# Altium footprint library LED-Optocupler$.PcbLib: 72 footprints (part 3 of 5)
Each footprint in its own frame and in the unit in brackets; x right, y up, seen from the top. Pads: shape width x height; smd on the part's side, far side on the other; paste and mask are expansions set on the pad; w line width, h text height; cw(c..) or ccw(c..) is an arc to the next point about the centre after c.
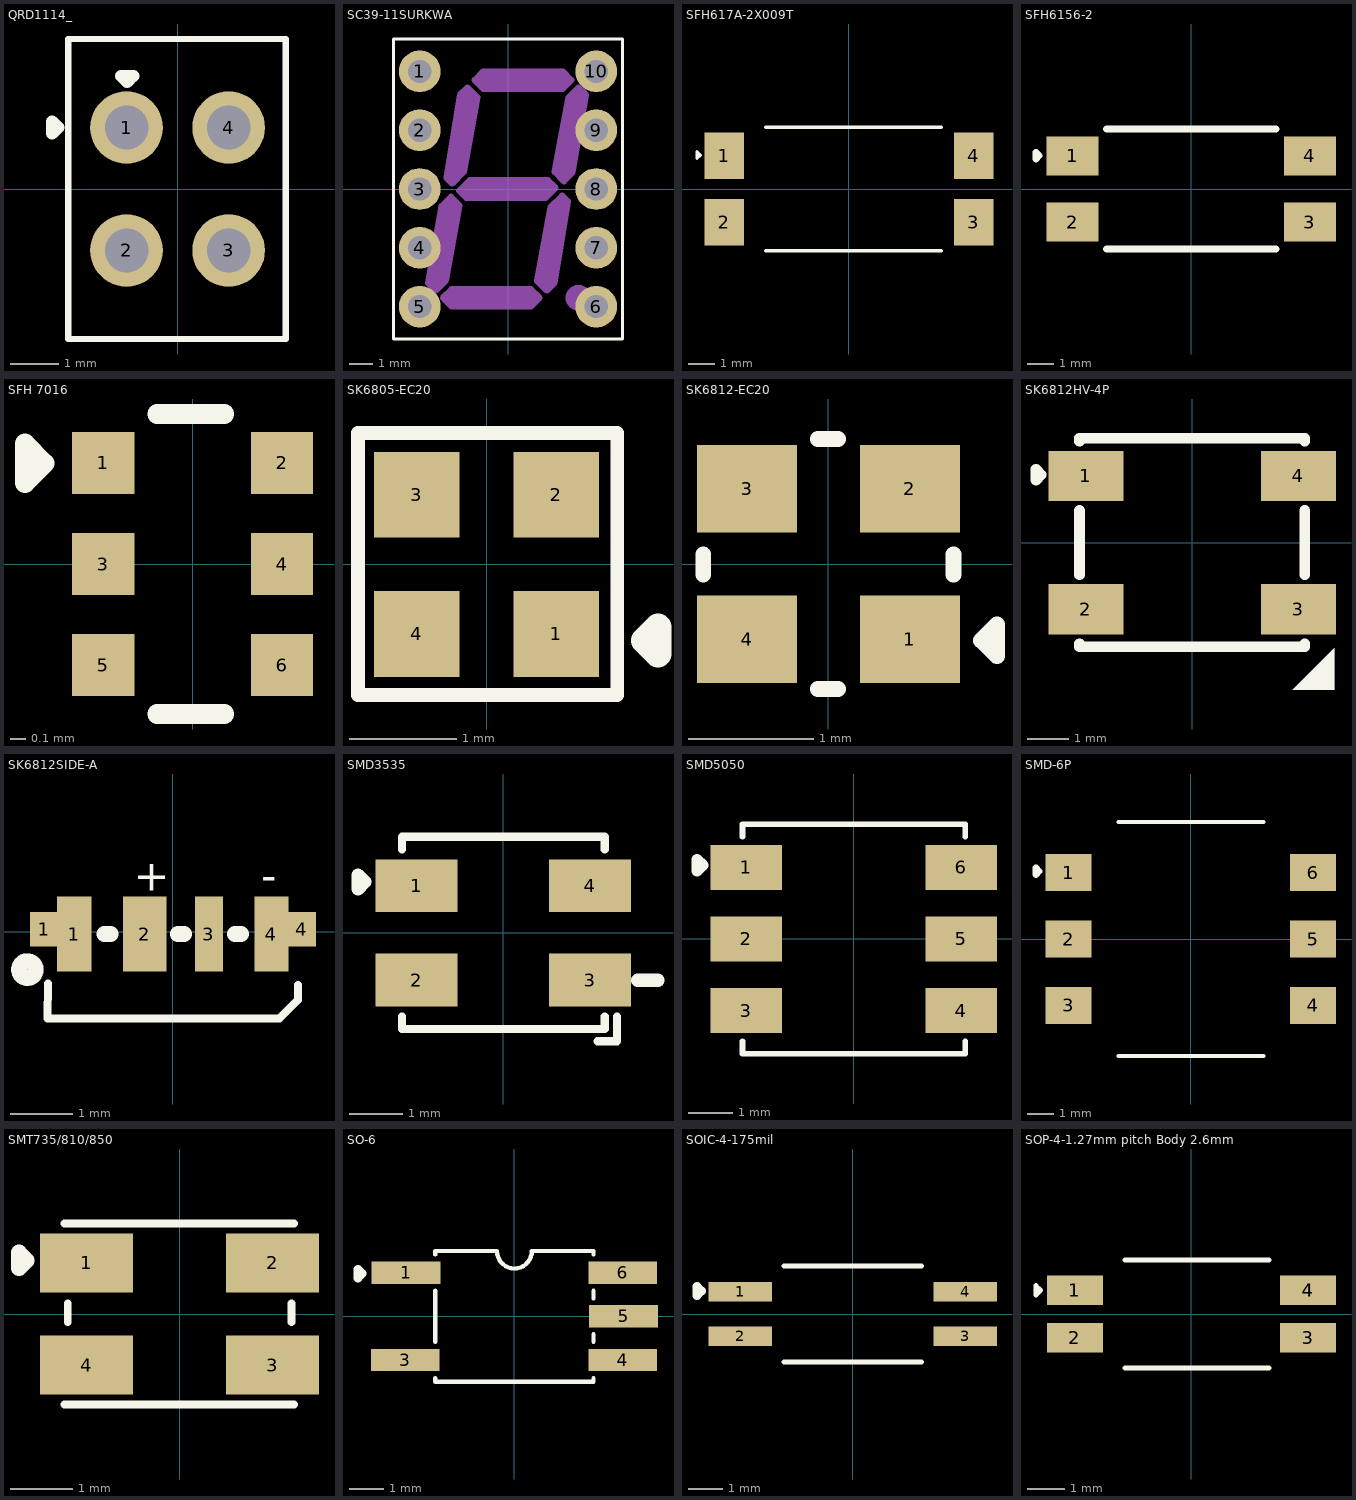
[diagram p2: the footprints below, top view; thin cyan lines are the x and y axes]

## QRD1114_ [mm]
pads (4):
  round 1.5 hole 0.9: 1(-1.055,1.27) 2(-1.055,-1.27) 3(1.055,-1.27) 4(1.055,1.27)
Top Overlay:
  lines w0.127: -2.261,-3.099 -2.261,3.099 2.235,3.099 2.235,-3.099 -2.261,-3.099
  lines w0.25: -2.591,1.143 -2.591,1.397 -2.464,1.27 -2.591,1.143 ; -1.168,2.337 -0.914,2.337 -1.041,2.21 -1.168,2.337
3D body "QRD1114.STEP": height 4.65, standoff -2, extent -2.205,-3.05 2.195,3.05

## SC39-11SURKWA [mm]
pads (10):
  round 1.8 hole 1: 1(-3.81,5.08) 2(-3.81,2.54) 3(-3.81,0) 4(-3.81,-2.54) 5(-3.81,-5.08) 6(3.81,-5.08) 7(3.81,-2.54) 8(3.81,0) 9(3.81,2.54) 10(3.81,5.08)
Top Overlay:
  lines w0.127: -4.953,-6.477 4.953,-6.477 4.953,6.477 -4.953,6.477 -4.953,-6.477
Mechanical 13:
  circle w0.61: c3.048,-4.699 r0.254
  lines w0.254: -3.454,-4.064 -2.87,-0.737 -2.464,-0.33 -2.083,-0.711 -2.667,-3.937 -3.124,-4.394 -3.454,-4.064 ; -2.819,-4.699 -2.438,-4.318 0.991,-4.318 1.372,-4.699 0.991,-5.08 -2.438,-5.08 -2.819,-4.699 ; -2.667,0.483 -2.413,0.229 -1.905,0.737 -1.321,3.962 -1.753,4.394 -2.083,4.064 -2.667,0.483 ; -2.108,-0.076 -1.651,0.381 1.727,0.381 2.057,0.051 1.626,-0.381 -1.803,-0.381 -2.108,-0.076 ; -1.448,4.699 -1.067,4.318 2.362,4.318 2.743,4.699 2.362,5.08 -1.067,5.08 -1.448,4.699 ; 1.245,-3.962 1.829,-0.787 2.337,-0.279 2.591,-0.533 2.007,-4.064 1.676,-4.394 1.245,-3.962 ; 2.007,0.737 2.616,3.962 3.048,4.394 3.378,4.064 2.794,0.711 2.413,0.33 2.007,0.737
  lines w0.305: 2.921,-4.699 3.175,-4.699
  lines w0.61: -3.048,-3.937 -2.413,-0.635 ; -2.413,-4.699 1.016,-4.699 ; -2.286,0.635 -1.778,3.937 ; -1.778,0 1.651,0 ; -1.016,4.699 2.413,4.699 ; 1.651,-3.937 2.286,-0.635 ; 2.413,0.762 3.048,4.064

## SFH617A-2X009T [mm]
pads (4):
  rect 1.52x1.78 smd mask+0.07: 1(-4.765,1.27) 2(-4.765,-1.27) 3(4.765,-1.27) 4(4.765,1.27)
Top Overlay:
  lines w0.127: -3.175,-2.362 3.531,-2.362 ; -3.175,2.362 3.531,2.362 ; -5.806,1.168 -5.806,1.422 -5.679,1.295 -5.806,1.168
3D body "DIP4-OP7.STEP": height 3.75, standoff 0.06, extent -5.08,-2.29 5.08,2.29

## SFH6156-2 [mm]
pads (4):
  rect 2x1.5 smd: 1(-4.55,1.27) 2(-4.55,-1.27) 3(4.55,-1.27) 4(4.55,1.27)
Top Overlay:
  lines w0.254: -3.25,-2.3 3.25,-2.3 ; -3.25,2.3 3.25,2.3 ; -5.956,1.152 -5.956,1.406 -5.829,1.279 -5.956,1.152
3D body "C5156027.step": height 3.67, standoff 0, extent -4.9,-2.35 4.9,2.35

## SFH 7016 [mm]
pads (6):
  rect 0.4x0.4 smd: 1(-0.575,0.65) 2(0.575,0.65) 3(-0.575,0) 4(0.575,0) 5(-0.575,-0.65) 6(0.575,-0.65)
Top Overlay:
  lines w0.127: -0.229,-0.965 0.203,-0.965 ; -0.229,0.965 0.203,0.965 ; -1.079,0.521 -1.079,0.775 -0.953,0.648 -1.079,0.521
3D body "SFH_7016.stp": height 0.58, standoff -0.02, extent -0.825,-0.925 0.825,0.925

## SK6805-EC20 [mm]
pads (4):
  rect 0.8x0.8 smd: 1(0.65,-0.65) 2(0.65,0.65) 3(-0.65,0.65) 4(-0.65,-0.65)
Top Overlay:
  lines w0.127: 1.219,1.219 1.219,-1.219 -1.199,-1.219 -1.199,1.225 1.219,1.225
  lines w0.25: 1.473,-0.711 1.6,-0.838 1.6,-0.584 1.473,-0.711
3D body "C2890036.step": height 0.67, standoff 0, extent -1,-1.01 1,1

## SK6812-EC20 [mm]
pads (4):
  rect 0.8x0.7 smd: 1(0.65,-0.6) 2(0.65,0.6) 3(-0.65,0.6) 4(-0.65,-0.6)
Top Overlay:
  lines w0.127: -1,-0.086 -1,0.076 ; -0.086,-1 0.076,-1 ; -0.086,1 0.076,1 ; 1,-0.086 1,0.076 ; 1.219,-0.61 1.346,-0.737 1.346,-0.483 1.219,-0.61
3D body "OPSCO-Optoelectronics-SK6812-EC20_C2909058.STEP": height 0.65, standoff -0.01, extent -1,-1 1,1

## SK6812HV-4P [mm]
pads (4):
  rect 1.8x1.2 smd paste+0 mask+0.051: 1(-2.55,1.6) 2(-2.55,-1.6) 3(2.55,-1.6) 4(2.55,1.6)
Top Overlay:
  region: 3.41,-3.53 2.41,-3.53 3.41,-2.53
  lines w0.254: -2.7,-2.431 -2.7,-2.5 2.7,-2.5 2.7,-2.431 ; -2.7,-0.769 -2.7,0.769 ; -2.7,2.47 -2.7,2.431 -2.7,2.5 2.7,2.5 2.7,2.431 ; 2.7,-0.769 2.7,0.769 ; -3.744,1.498 -3.744,1.752 -3.617,1.625 -3.744,1.498
Mechanical 15:
  region: 3.41,-3.53 2.41,-3.53 3.41,-2.53
3D body "SK6812HV-4P-1.STEP": height 1.65, standoff 0, extent -2.7,-2.5 2.7,2.5

## SK6812SIDE-A [mm] "SMD-4P,1.6x4mm Light Emitting Diodes (LED) ROHS"
pads (6):
  rect 0.45x0.55 smd: 1(-2.06,0.038) 4(2.06,0.038)
  rect 0.55x1.2 smd: 1(-1.575,-0.038) 4(1.575,-0.038)
  rect 0.7x1.2 smd: 2(-0.45,-0.038)
  rect 0.45x1.2 smd: 3(0.575,-0.038)
Top Overlay:
  circle w0.254: c-2.327,-0.604 r0.134
  lines w0.127: -2,-0.825 -2.006,-1.383 1.704,-1.383 2,-1.088 ; 2,-1.092 2,-0.85
  lines w0.254: -1.092,-0.038 -0.994,-0.038 ; 0.078,-0.038 0.176,-0.038 ; 0.992,-0.038 1.09,-0.038
  text "+" at -0.624,0.652 h0.5
  text "-" at 1.408,0.652 h0.5
3D body "SK6812SIDE-A.STEP": height 2, standoff 0, extent -2.045,-1.338 1.955,0.262

## SMD3535 [mm]
pads (4):
  rect 1.545x0.997 smd paste+0 mask+0.051: 1(-1.638,0.89) 2(-1.638,-0.89) 3(1.638,-0.89) 4(1.638,0.89)
Top Overlay:
  lines w0.152: -1.916,-1.579 -1.916,-1.816 1.916,-1.816 1.916,-1.579 ; -1.916,1.579 -1.916,1.816 1.916,1.816 1.916,1.579 ; 1.777,-2.045 2.145,-2.045 2.145,-1.579
  lines w0.254: 2.54,-0.889 2.921,-0.889 ; -2.743,0.838 -2.743,1.092 -2.616,0.965 -2.743,0.838
3D body "C527089.step": height 3.66, standoff 1.6, extent -1.85,-1.85 1.85,1.861

## SMD5050 [mm]
pads (6):
  rect 1.6x1 smd: 1(-2.4,1.6) 2(-2.4,0) 3(-2.4,-1.6) 4(2.4,-1.6) 5(2.4,0) 6(2.4,1.6)
Top Overlay:
  lines w0.127: -2.489,-2.286 -2.489,-2.565 2.489,-2.565 2.489,-2.286 ; -2.489,2.286 -2.489,2.565 2.489,2.565 2.489,2.286
  lines w0.254: -3.505,1.524 -3.378,1.651 -3.505,1.778 -3.505,1.524
3D body "LED SMD 5050 RGB.stp": height 1.62, standoff 0, extent -2.657,-2.5 2.743,2.5

## SMD-6P [mm]
pads (6):
  rect 1.75x1.422 smd: 1(-4.675,2.54) 2(-4.675,0) 3(-4.675,-2.54) 4(4.675,-2.54) 5(4.675,0) 6(4.675,2.54)
Top Overlay:
  lines w0.152: -2.771,-4.476 2.772,-4.476 ; -2.771,4.476 2.772,4.476
  lines w0.254: -5.92,2.464 -5.92,2.718 -5.793,2.591 -5.92,2.464
3D body "C111561.step": height 3.6, standoff 0, extent -4.8,-4.4 4.8,4.4

## SMT735/810/850 [mm]
pads (4):
  rect 1.5x0.95 smd: 1(-1.5,0.825) 2(1.5,0.825) 3(1.5,-0.825) 4(-1.5,-0.825)
Top Overlay:
  lines w0.127: -1.856,-1.461 1.844,-1.461 ; -1.856,1.461 1.844,1.461 ; -1.805,-0.131 -1.805,0.169 ; 1.805,-0.131 1.805,0.169
  lines w0.254: -2.591,0.737 -2.591,0.991 -2.464,0.864 -2.591,0.737
3D body "SMT735.STEP": height 1.9, standoff 0, extent -1.75,-1.35 1.75,1.35

## SO-6 [mm]
pads (5):
  rect 2x0.65 smd: 1(-3.15,1.27) 3(-3.175,-1.27) 4(3.15,-1.27) 5(3.175,0) 6(3.15,1.27)
Top Overlay:
  lines w0.127: -2.3,-1.798 -2.3,-1.9 2.3,-1.9 2.3,-1.798 ; -2.3,-0.742 -2.3,0.742 ; -2.3,1.798 -2.3,1.9 -0.508,1.9 ccw(c0,1.9) 0.508,1.9 2.3,1.9 ; 2.3,-0.742 2.3,-0.519 ; 2.3,0.519 2.3,0.742 ; 2.3,1.9 2.3,1.798 2.3,1.9
  lines w0.254: -4.547,1.118 -4.547,1.372 -4.42,1.245 -4.547,1.118
3D body "C85066.step": height 2.2, standoff 0, extent -3.5,-1.85 3.5,1.85

## SOIC-4-175mil [mm]
pads (4):
  rect 1.827x0.56 smd paste+0 mask+0.051: 1(-3.223,0.635) 2(-3.223,-0.635) 3(3.223,-0.635) 4(3.223,0.635)
Top Overlay:
  lines w0.152: -1.971,-1.376 1.971,-1.376 ; -1.971,1.376 1.971,1.376
  lines w0.254: -4.468,0.533 -4.468,0.787 -4.341,0.66 -4.468,0.533
3D body "C4749236.step": height 2.1, standoff 0, extent -3.503,-1.3 3.503,1.3

## SOP-4-1.27mm pitch Body 2.6mm [mm]
pads (5):
  rect 1.5x0.8 smd: 1(-3.125,0.635) 2(-3.125,-0.635) 3(3.125,-0.635) 4(3.125,0.635) 4(3.125,0.635)
Top Overlay:
  lines w0.127: -1.778,-1.448 2.083,-1.448 ; -1.778,1.448 2.083,1.448 ; -4.166,0.508 -4.039,0.635 -4.166,0.762 -4.166,0.508
3D body "User Library-SOP-4-1.step": height 2.1, standoff 0, extent -3.5,-1.4 3.5,1.4